# Altium footprint library Amin-Library.PcbLib: 601 footprints (part 25 of 38)
Each footprint in its own frame and in the unit in brackets; x right, y up, seen from the top. Pads: shape width x height; smd on the part's side, far side on the other; paste and mask are expansions set on the pad; w line width, h text height; cw(c..) or ccw(c..) is an arc to the next point about the centre after c.
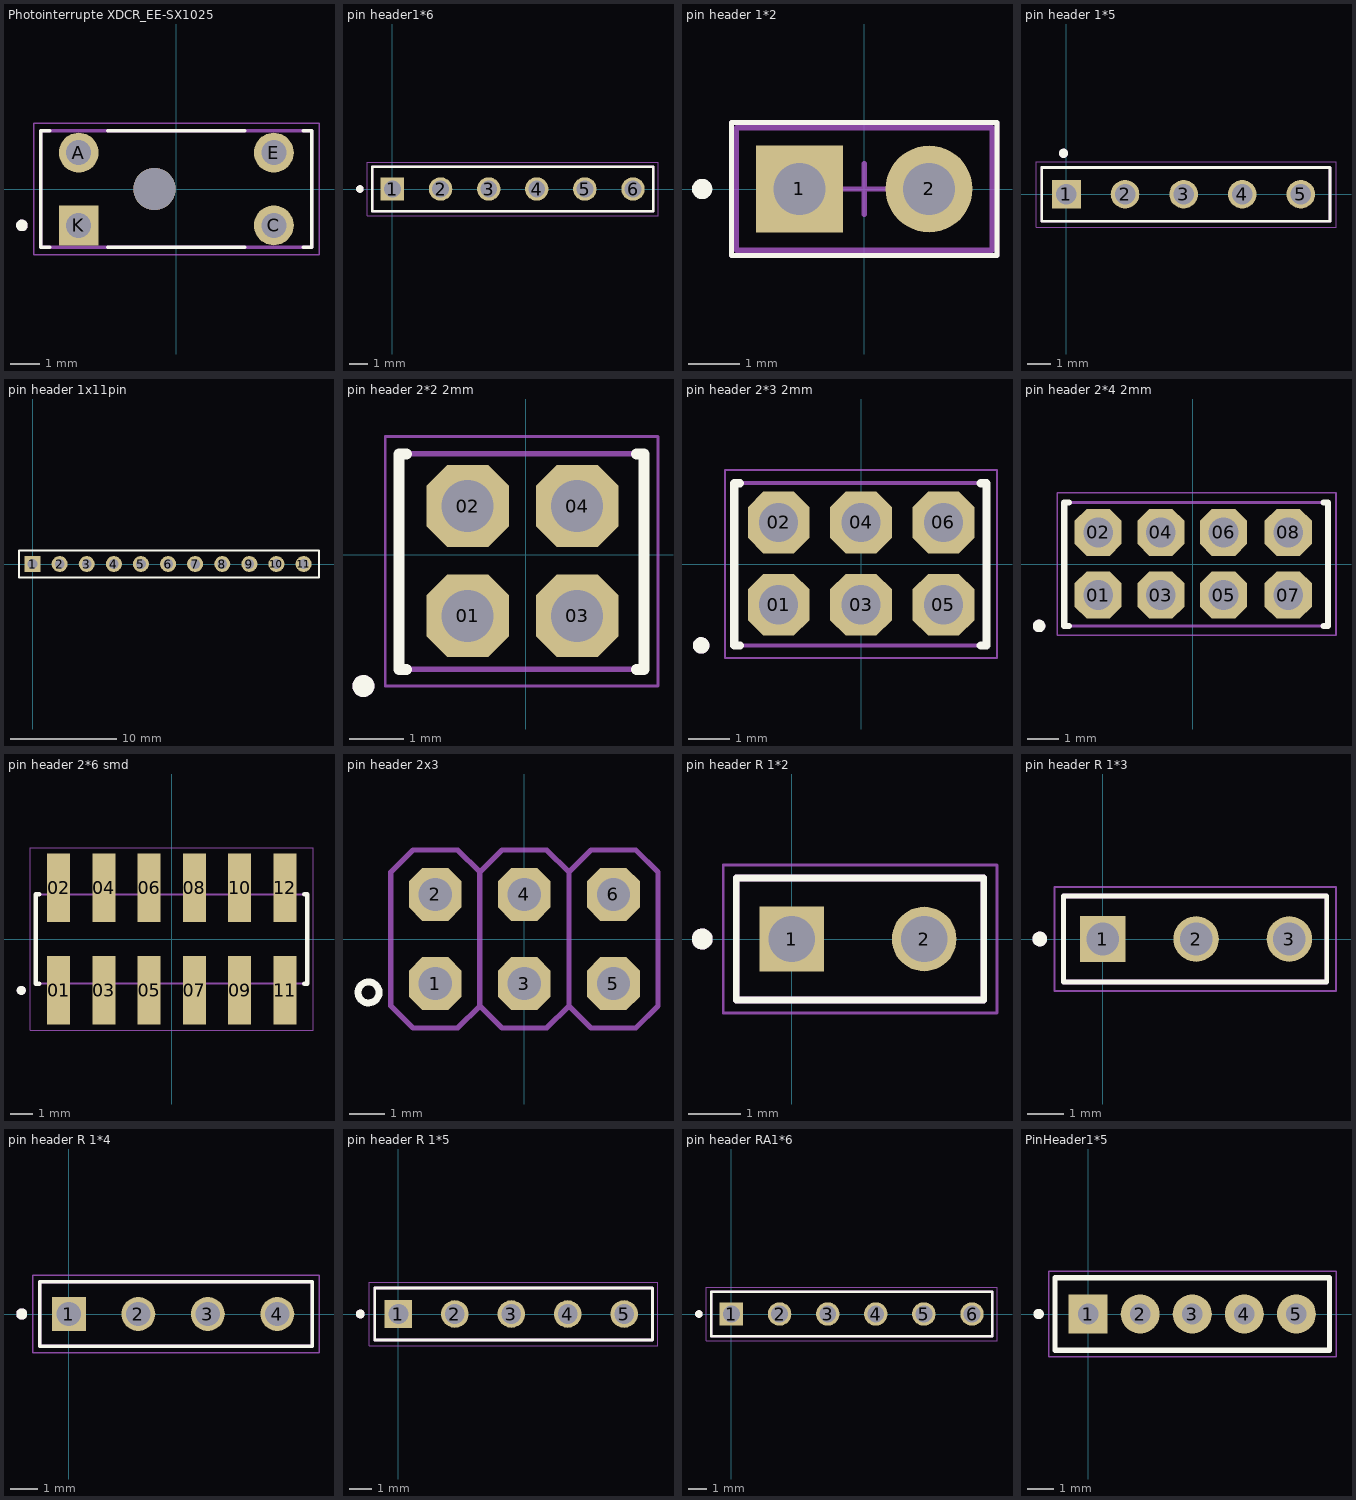
[diagram p24: the footprints below, top view; thin cyan lines are the x and y axes]

## Photointerrupte XDCR_EE-SX1025 [mm]
pads (5):
  round 1.368 hole 0.86: A(-3.35,1.25) C(3.35,-1.25) E(3.35,1.25)
  rect 1.368x1.368 hole 0.86: K(-3.35,-1.25)
  round 1.45 hole 1.45 unplated: ""(-0.75,0)
Top Overlay:
  circle w0.2: c-5.3,-1.25 r0.1
  lines w0.127: -4.355,-2 -4.65,-2 -4.65,2 -4.355,2 ; -2.345,-2 2.345,-2 ; -2.345,2 2.345,2 ; 4.355,-2 4.65,-2 4.65,2 4.355,2
Mechanical 13:
  circle w0.2: c-5.3,-1.25 r0.1
  lines w0.127: -4.65,-2 -4.65,2 4.65,2 4.65,-2 -4.65,-2
Mechanical 15:
  lines w0.05: -4.9,-2.25 -4.9,2.25 4.9,2.25 4.9,-2.25 -4.9,-2.25
3D body "step_temp.STEP": height 6, standoff -9, extent -4.063,-2.127 3.937,1.873

## pin header1*6 [mm]
pads (6):
  rect 1.24x1.24 hole 0.89: 1(0,0)
  round 1.24 hole 0.89: 2(2.54,0) 3(5.08,0) 4(7.62,0) 5(10.16,0) 6(12.7,0)
Top Overlay:
  circle w0.2: c-1.72,0 r0.1
  lines w0.127: -1.07,-1.17 -1.07,1.17 13.77,1.17 13.77,-1.17 -1.07,-1.17
Mechanical 4:
  circle w0.2: c-1.72,0 r0.1
  circle w0.2: c-1.72,0 r0.1
  lines w0.127: -1.07,-1.17 -1.07,1.17 ; -1.07,-1.17 13.77,-1.17 ; -1.07,-1.17 13.77,-1.17 ; -1.07,-1.17 -1.07,1.17 ; -1.07,-1.17 13.77,-1.17 ; -1.07,-1.17 13.77,-1.17 ; -1.07,1.17 13.77,1.17 ; -1.07,1.17 13.77,1.17 ; 13.77,-1.17 13.77,1.17 ; 13.77,-1.17 13.77,1.17
Mechanical 16:
  lines w0.05: -1.32,-1.42 -1.32,1.42 14.02,1.42 14.02,-1.42 -1.32,-1.42
3D body "User Library-Header_Male_6Pin.STEP": height 8.54, standoff -3, extent -1.27,-1.245 13.97,1.245

## pin header 1*2 [mm] "2.54MM"
pads (2):
  rect 1.7x1.7 hole 1.016: 1(-1.27,0)
  round 1.7 hole 1.016: 2(1.27,0)
Top Overlay:
  circle w0.2: c-3.175,0 r0.1
  lines w0.1: -2.6,-1.3 -2.6,1.3 2.6,1.3 2.6,-1.3 -2.6,-1.3
Top Courtyard:
  lines w0.1: -2.5,-1.2 -2.5,1.2 2.5,1.2 2.5,-1.2 -2.5,-1.2
Mechanical 15:
  lines w0.1: -0.5,0 0.5,0 ; -0.1,1.3 2.6,1.3 2.6,-1.3 -2.6,-1.3 -2.6,1.3 0.5,1.3 ; 0,-0.5 0,0.5
3D body "header02.STEP": height 8.38, standoff -2.54, extent -2.54,-1.27 2.54,1.27
3D body "jumper_akspt_g-red.STEP": height 8.57, standoff 2.6, extent -2.49,-1.22 2.49,1.22

## pin header 1*5 [mm] "2.54MM"
pads (5):
  rect 1.24x1.24 hole 0.89: 1(0,0)
  round 1.24 hole 0.89: 2(2.54,0) 3(5.08,0) 4(7.62,0) 5(10.16,0)
Top Overlay:
  circle w0.2: c-0.127,1.778 r0.1
  lines w0.127: -1.07,-1.17 11.43,-1.17 11.43,1.17 -1.07,1.17 -1.07,-1.17
Mechanical 4:
  circle w0.2: c-0.127,1.778 r0.1
  circle w0.2: c-0.127,1.778 r0.1
  lines w0.127: -1.07,-1.17 11.43,-1.17 ; -1.07,-1.17 11.43,-1.17 ; -1.07,-1.17 -1.07,1.17 ; -1.07,-1.17 11.43,-1.17 ; -1.07,-1.17 11.43,-1.17 ; -1.07,-1.17 -1.07,1.17 ; -1.07,1.17 11.43,1.17 ; -1.07,1.17 11.43,1.17 ; 11.43,-1.17 11.43,1.17 ; 11.43,-1.17 11.43,1.17
Mechanical 16:
  lines w0.05: -1.32,-1.42 -1.32,1.42 11.684,1.42 11.684,-1.42 -1.32,-1.42

## pin header 1x11pin [mm] "Connector; Header; 11 Position 2.54"
height 4.32
pads (11):
  rect 1.5x1.5 hole 0.9: 1(0,0)
  round 1.5 hole 0.9: 2(2.54,0) 3(5.08,0) 4(7.62,0) 5(10.16,0) 6(12.7,0) 7(15.24,0) 8(17.78,0) 9(20.32,0) 10(22.86,0) 11(25.4,0)
Top Overlay:
  lines w0.2: -1.27,-1.27 -1.27,1.27 0.635,1.27 26.848,1.27 26.848,-1.27 -1.27,-1.27
3D body "Pin Header  2.54-11.stp": height 10.13, standoff -3.37, extent -1.245,-1.194 26.695,1.346

## pin header 2*2 2mm [mm]
pads (4):
  oct 1.501x1.501 / inner oct 1.524x1.524 / far side oct 1.501x1.501 hole 0.95: 01(-1.063,-1.116) 02(-1.063,0.889) 03(0.937,-1.116) 04(0.937,0.889)
Top Overlay:
  circle w0.2: c-2.967,-2.4 r0.1
  lines w0.2: -2.177,-2.097 -2.317,-2.097 -2.317,1.843 -2.177,1.843 ; 2.019,-2.097 2.159,-2.097 2.159,1.843 2.019,1.843
Mechanical 13:
  circle w0.2: c-2.967,-2.4 r0.1
  lines w0.1: -2.317,-2.097 -2.317,1.843 ; -2.317,-2.097 2.159,-2.097 2.159,1.843 -2.317,1.843 ; -2.317,-2.097 -2.317,1.843
Mechanical 15:
  lines w0.05: -2.567,-2.4 2.413,-2.4 2.413,2.159 -2.567,2.159 -2.567,-2.4
3D body "62000421121.stp": height 6.01, standoff -2.69, extent -2.127,-2.127 1.873,1.873

## pin header 2*3 2mm [mm]
pads (6):
  oct 1.501x1.501 / inner oct 1.524x1.524 / far side oct 1.501x1.501 hole 0.95: 01(-2,-0.984) 02(-2,1.016) 03(0,-0.984) 04(0,1.016) 05(2,-0.984) 06(2,1.016)
Top Overlay:
  circle w0.2: c-3.883,-1.97 r0.1
  lines w0.2: -2.939,-1.97 -3.079,-1.97 -3.079,1.97 -2.939,1.97 ; 2.908,-1.97 3.048,-1.97 3.048,1.97 2.908,1.97
Mechanical 13:
  circle w0.2: c-3.883,-1.97 r0.1
  lines w0.1: 2.978,1.97 -3.079,1.97 ; -3.079,-1.97 -3.079,1.97 ; -3.079,-1.97 3.048,-1.97 3.048,1.97 -3.079,1.97 ; -3.079,-1.97 -3.079,-1.716 -3.079,1.97
Mechanical 15:
  lines w0.05: -3.302,-2.273 3.302,-2.273 3.302,2.286 -3.302,2.286 -3.302,-2.273
3D body "62000621121.stp": height 6.01, standoff -2.69, extent -3,-2 3,2

## pin header 2*4 2mm [mil]
pads (8):
  oct 59.08x59.08 / inner oct 60x60 / far side oct 59.08x59.08 hole 37.4: 01(-118.74,-38.74) 02(-118.74,40) 03(-40,-38.74) 04(-40,40) 05(38.74,-38.74) 06(38.74,40) 07(120,-38.74) 08(120,40)
Top Overlay:
  circle w7.87: c-192.87,-77.56 r3.94
  lines w7.87: -155.71,-77.56 -161.22,-77.56 -161.22,77.56 -155.71,77.56 ; 164.49,-77.56 170,-77.56 170,77.56 164.49,77.56
Mechanical 13:
  circle w7.87: c-192.87,-77.56 r3.94
  lines w3.94: 77.24,77.56 -161.22,77.56 ; -161.22,-77.56 -161.22,77.56 ; -161.22,-77.56 170,-77.56 170,77.56 -161.22,77.56 ; -161.22,-77.56 -161.22,-67.56 -161.22,77.56
Mechanical 15:
  lines w1.97: -170,-89.47 180,-89.47 180,90 -170,90 -170,-89.47
3D body "62000821121.stp": height 236.72, standoff -105.8, extent -157.48,-83.73 157.48,73.74

## pin header 2*6 smd [mm]
pads (12):
  rect 1.02x3.025 smd: 01(-5,-2.272) 02(-5,2.272) 03(-3,-2.272) 04(-3,2.272) 05(-1,-2.272) 06(-1,2.272) 07(1,-2.272) 08(1,2.272) 09(3,-2.272) 10(3,2.272) 11(5,-2.272) 12(5,2.272)
Top Overlay:
  circle w0.2: c-6.65,-2.272 r0.1
  lines w0.2: -5.86,-1.97 -6,-1.97 -6,1.97 -5.86,1.97 ; 5.86,-1.97 6,-1.97 6,1.97 5.86,1.97
Mechanical 13:
  circle w0.2: c-6.65,-2.272 r0.1
  lines w0.1: -6,-1.97 -6,1.97 ; -6,-1.97 6,-1.97 ; -6,-1.97 -6,1.97 ; -6,1.97 6,1.97 ; -6,1.97 6,1.97 ; 6,-1.97 6,1.97 ; 6,-1.97 6,1.97
Mechanical 15:
  lines w0.05: -6.25,-4.035 -6.25,4.035 6.25,4.035 6.25,-4.035 -6.25,-4.035
3D body "TW-06-09-F-D-170-SM.stp": height 9.87, standoff 0.01, extent -6,-3.365 6,3.365

## pin header 2x3 [mm] "2X03"
pads (6):
  oct 1.501x1.501 / inner oct 1.524x1.524 / far side oct 1.501x1.501 hole 0.95: 1(-2.54,-1.27) 2(-2.54,1.27) 3(0,-1.27) 4(0,1.27) 5(2.54,-1.27) 6(2.54,1.27)
Top Overlay:
  circle w0.2: c-4.445,-1.524 r0.3
Mechanical 3:
  region: 2.286,-1.524 2.286,-1.016 2.794,-1.016 2.794,-1.524
  region: 2.286,1.016 2.286,1.524 2.794,1.524 2.794,1.016
  region: -0.254,-1.524 -0.254,-1.016 0.254,-1.016 0.254,-1.524
  region: -0.254,1.016 -0.254,1.524 0.254,1.524 0.254,1.016
  region: -2.794,1.016 -2.794,1.524 -2.286,1.524 -2.286,1.016
  region: -2.794,-1.524 -2.794,-1.016 -2.286,-1.016 -2.286,-1.524
Bottom Courtyard:
  lines w0.152: -1.27,-1.905 -1.27,1.905 ; -1.27,-1.905 -0.635,-2.54 0.635,-2.54 1.27,-1.905 ; -1.27,-1.905 -1.905,-2.54 -3.175,-2.54 -3.81,-1.905 -3.81,1.905 -3.175,2.54 -1.905,2.54 -1.27,1.905 ; -1.27,1.905 -0.635,2.54 0.635,2.54 1.27,1.905 ; 1.27,-1.905 1.905,-2.54 3.175,-2.54 3.81,-1.905 3.81,1.905 3.175,2.54 1.905,2.54 1.27,1.905 ; 1.27,-1.905 1.27,1.905
3D body "User Library-Header3x2_100_TH.STEP": height 8.45, standoff -2.53, extent -3.815,-2.54 3.805,2.54

## pin header R 1*2 [mm] "2.54MM"
pads (2):
  rect 1.24x1.24 hole 0.89: 1(0,0)
  round 1.24 hole 0.89: 2(2.54,0)
Top Overlay:
  circle w0.2: c-1.72,0 r0.1
  lines w0.127: -1.07,-1.17 -1.07,1.17 3.683,1.17 3.683,-1.17 -1.07,-1.17
Mechanical 4:
  circle w0.2: c-1.72,0 r0.1
  circle w0.2: c-1.72,0 r0.1
  lines w0.127: -1.07,-1.17 3.683,-1.17 ; -1.07,-1.17 3.683,-1.17 ; -1.07,-1.17 -1.07,1.17 ; -1.07,-1.17 3.683,-1.17 ; -1.07,-1.17 3.683,-1.17 ; -1.07,-1.17 -1.07,1.17 ; -1.07,1.17 3.683,1.17 ; -1.07,1.17 3.683,1.17 ; 3.683,-1.17 3.683,1.17
Mechanical 16:
  lines w0.05: -1.32,-1.42 3.937,-1.42 3.937,1.42 -1.32,1.42 -1.32,-1.42
3D body "2Pin Right.step": height 4.4, standoff -2.9, extent -1.26,-1.27 3.82,7.18

## pin header R 1*3 [mm] "2.54MM"
pads (3):
  rect 1.24x1.24 hole 0.89: 1(0,0)
  round 1.24 hole 0.89: 2(2.54,0) 3(5.08,0)
Top Overlay:
  circle w0.2: c-1.72,0 r0.1
  lines w0.127: -1.07,-1.17 6.096,-1.17 6.096,1.17 -1.07,1.17 -1.07,-1.17
Mechanical 4:
  circle w0.2: c-1.72,0 r0.1
  circle w0.2: c-1.72,0 r0.1
  lines w0.127: -1.07,-1.17 -1.07,1.17 ; -1.07,-1.17 6.096,-1.17 ; -1.07,-1.17 6.096,-1.17 ; -1.07,-1.17 -1.07,1.17 ; -1.07,-1.17 6.096,-1.17 ; -1.07,-1.17 6.096,-1.17 ; -1.07,1.17 6.096,1.17 ; -1.07,1.17 6.096,1.17 ; 6.096,-1.17 6.096,1.17
Mechanical 16:
  lines w0.05: -1.32,-1.42 -1.32,1.42 6.35,1.42 6.35,-1.42 -1.32,-1.42

## pin header R 1*4 [mm] "2.54MM"
pads (4):
  rect 1.24x1.24 hole 0.89: 1(0,0)
  round 1.24 hole 0.89: 2(2.54,0) 3(5.08,0) 4(7.62,0)
Top Overlay:
  circle w0.2: c-1.72,0 r0.1
  lines w0.127: -1.07,-1.17 -1.07,1.17 8.89,1.17 8.89,-1.17 -1.07,-1.17
Mechanical 4:
  circle w0.2: c-1.72,0 r0.1
  circle w0.2: c-1.72,0 r0.1
  lines w0.127: 8.636,1.17 -1.07,1.17 ; -1.07,-1.17 8.89,-1.17 8.89,1.17 -1.07,1.17 ; -1.07,-1.17 -1.07,1.17 ; -1.07,-1.17 8.636,-1.17 ; -1.07,-1.17 8.636,-1.17 ; -1.07,-1.17 -1.07,1.17 ; -1.07,-1.17 8.636,-1.17
Mechanical 16:
  lines w0.05: -1.32,-1.42 9.144,-1.42 9.144,1.42 -1.32,1.42 -1.32,-1.42

## pin header R 1*5 [mm] "2.54MM"
pads (5):
  rect 1.24x1.24 hole 0.89: 1(0,0)
  round 1.24 hole 0.89: 2(2.54,0) 3(5.08,0) 4(7.62,0) 5(10.16,0)
Top Overlay:
  circle w0.2: c-1.72,0 r0.1
  lines w0.127: -1.07,-1.17 11.43,-1.17 11.43,1.17 -1.07,1.17 -1.07,-1.17
Mechanical 4:
  circle w0.2: c-1.72,0 r0.1
  circle w0.2: c-1.72,0 r0.1
  lines w0.127: -1.07,-1.17 11.43,-1.17 ; -1.07,-1.17 11.43,-1.17 ; -1.07,-1.17 -1.07,1.17 ; -1.07,-1.17 11.43,-1.17 ; -1.07,-1.17 11.43,-1.17 ; -1.07,-1.17 -1.07,1.17 ; -1.07,1.17 11.43,1.17 ; -1.07,1.17 11.43,1.17 ; 11.43,-1.17 11.43,1.17 ; 11.43,-1.17 11.43,1.17
Mechanical 16:
  lines w0.05: -1.32,-1.42 -1.32,1.42 11.684,1.42 11.684,-1.42 -1.32,-1.42
3D body "pin_header_aw140-ea-g05g.stp": height 1.25, standoff -3.65, extent -1.07,-10.65 11.43,0.49

## pin header RA1*6 [mm]
pads (6):
  rect 1.24x1.24 hole 0.89: 1(0,0)
  round 1.24 hole 0.89: 2(2.54,0) 3(5.08,0) 4(7.62,0) 5(10.16,0) 6(12.7,0)
Top Overlay:
  circle w0.2: c-1.72,0 r0.1
  lines w0.127: -1.07,-1.17 -1.07,1.17 13.77,1.17 13.77,-1.17 -1.07,-1.17
Mechanical 4:
  circle w0.2: c-1.72,0 r0.1
  circle w0.2: c-1.72,0 r0.1
  lines w0.127: -1.07,-1.17 -1.07,1.17 ; -1.07,-1.17 13.77,-1.17 ; -1.07,-1.17 13.77,-1.17 ; -1.07,-1.17 -1.07,1.17 ; -1.07,-1.17 13.77,-1.17 ; -1.07,-1.17 13.77,-1.17 ; -1.07,1.17 13.77,1.17 ; -1.07,1.17 13.77,1.17 ; 13.77,-1.17 13.77,1.17 ; 13.77,-1.17 13.77,1.17
Mechanical 16:
  lines w0.05: -1.32,-1.42 -1.32,1.42 14.02,1.42 14.02,-1.42 -1.32,-1.42
3D body "User Library-Header_Male_RA_Low_6Pin.STEP": height 2.51, standoff -3, extent -1.27,-0.32 13.97,9.81

## PinHeader1*5 [mm]
pads (5):
  rect 1.5x1.5 hole 0.8: 1(0,0)
  round 1.5 hole 0.8: 2(2,0) 3(4,0) 4(6,0) 5(8,0)
Top Overlay:
  circle w0.2: c-1.905,0 r0.1
  lines w0.2: -1.27,-1.397 -1.27,1.397 9.271,1.397 9.271,-1.397 -1.27,-1.397
Mechanical 13:
  lines w0.1: -1.27,-1.397 9.271,-1.397 9.271,1.397 -1.27,1.397 -1.27,-1.397
Mechanical 15:
  lines w0.05: -1.524,-1.651 9.525,-1.651 9.525,1.651 -1.524,1.651 -1.524,-1.651